# EAGLE library part 6210XX21021_62102821021 (library WR-PHD)
WR-PHD 1.27 mm SMT Dual Pin Header, H=3.80 mm Article Properties Pins 4 unitless; 6 unitless; 8 unitless; 10 unitless; 14 unitless; 16 unitless; 20 unitless; 28 unitless; 40 unitless; 44 unitless; 50 unitless General Information Operating Temperature -40 °C up to +105 °C Compliance Lead free / RoHS Pitch 1.27 mm Durability 50 Cycles Rows Dual Gender Pin Header Type Straight Material Properties Insulator Material PA9T Insulator Flammability Rating UL94 V-0 Contact Material Copper Alloy Contact Plating Gold Contact Type Stamped Certification UL Approval E323964 Packaging Properties Packaging Tape and Reel with Cap; Tube Electrical Properties IR 1 A Withstanding Voltage 500 V (AC) Contact Resistance 20 mΩ RISO 1000 MΩ <https://www.we-online.com/components/media/o33195v209%20Family_WR-PDH_621xxx21021.jpg> Details see: www.we-online.com/en/components/products/PHD_1_27_SMT_DUAL_PIN_HEADER_6210XX21021 <www.we-online.com/catalog/PHD_1_27_SMT_DUAL_PIN_HEADER_6210XX21021/?utm_source=eagle_model&utm_medium=description_link&utm_campaign=eisos_eagle> Updated by Ella 2024-01-31 2024 (C) Würth Elektronik
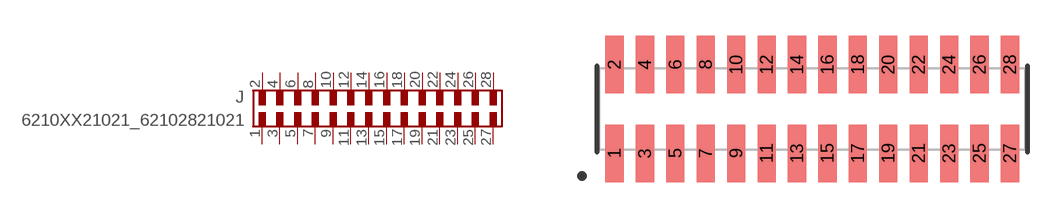
[diagram p391: symbol with the pads of 62102821021; footprint 62102821021]

Designator prefix J

## 6210XX21021_62102821021 (DATASHEET-URL: https://www.we-online.com/redexpert/spec/62102821021?ae; GENDER: Pin Header; IR: 1A; MOUNT: SMT; PACKAGING: Tube; PART-NUMBER: 62102821021; PINS: 28; PITCH: 1.27 mm; ROWS: Dual; TYPE: Straight; VALUE: 62102821021)  [62102821021]
1  1  pas
2  2  pas
3  3  pas
4  4  pas
5  5  pas
6  6  pas
7  7  pas
8  8  pas
9  9  pas
10  10  pas
11  11  pas
12  12  pas
13  13  pas
14  14  pas
15  15  pas
16  16  pas
17  17  pas
18  18  pas
19  19  pas
20  20  pas
21  21  pas
22  22  pas
23  23  pas
24  24  pas
25  25  pas
26  26  pas
27  27  pas
28  28  pas

## Footprint 62102821021 (pad centres in mm)
WR-PHD 1.27 mm SMT Dual Pin Header, H=3.80 mm, 28 Pins
smd 0.76 x 2.4: 1 -8.255,-1.85; 2 -8.255,1.85; 3 -6.985,-1.85; 4 -6.985,1.85; 5 -5.715,-1.85; 6 -5.715,1.85; 7 -4.445,-1.85; 8 -4.445,1.85; 9 -3.175,-1.85; 10 -3.175,1.85; 11 -1.905,-1.85; 12 -1.905,1.85; 13 -0.635,-1.85; 14 -0.635,1.85; 15 0.635,-1.85; 16 0.635,1.85; 17 1.905,-1.85; 18 1.905,1.85; 19 3.175,-1.85; 20 3.175,1.85; 21 4.445,-1.85; 22 4.445,1.85; 23 5.715,-1.85; 24 5.715,1.85; 25 6.985,-1.85; 26 6.985,1.85; 27 8.255,-1.85; 28 8.255,1.85